# Altium integrated library 54-00175 - Correct Headphone Jack for PCB Project 02.IntLib: 1 symbol
Pins are listed as number, name and electrical type; pins without a type are passive.

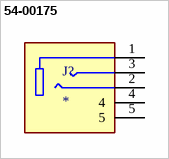
[diagram p0: symbol 54-00175]

## 54-00175
designator J?
MF: {'manufacturer': u'Tensility International Corp'}; MP: 54-00175; Package: None; Price: None; Value: *; Availability: Unavailable
footprint TENSILITY_54-00175
pins: 1, 2, 3, 4, 5